# Altium footprint library BB-18.PcbLib: 11 footprints
Each footprint in its own frame and in the unit in brackets; x right, y up, seen from the top. Pads: shape width x height; smd on the part's side, far side on the other; paste and mask are expansions set on the pad; w line width, h text height; cw(c..) or ccw(c..) is an arc to the next point about the centre after c.
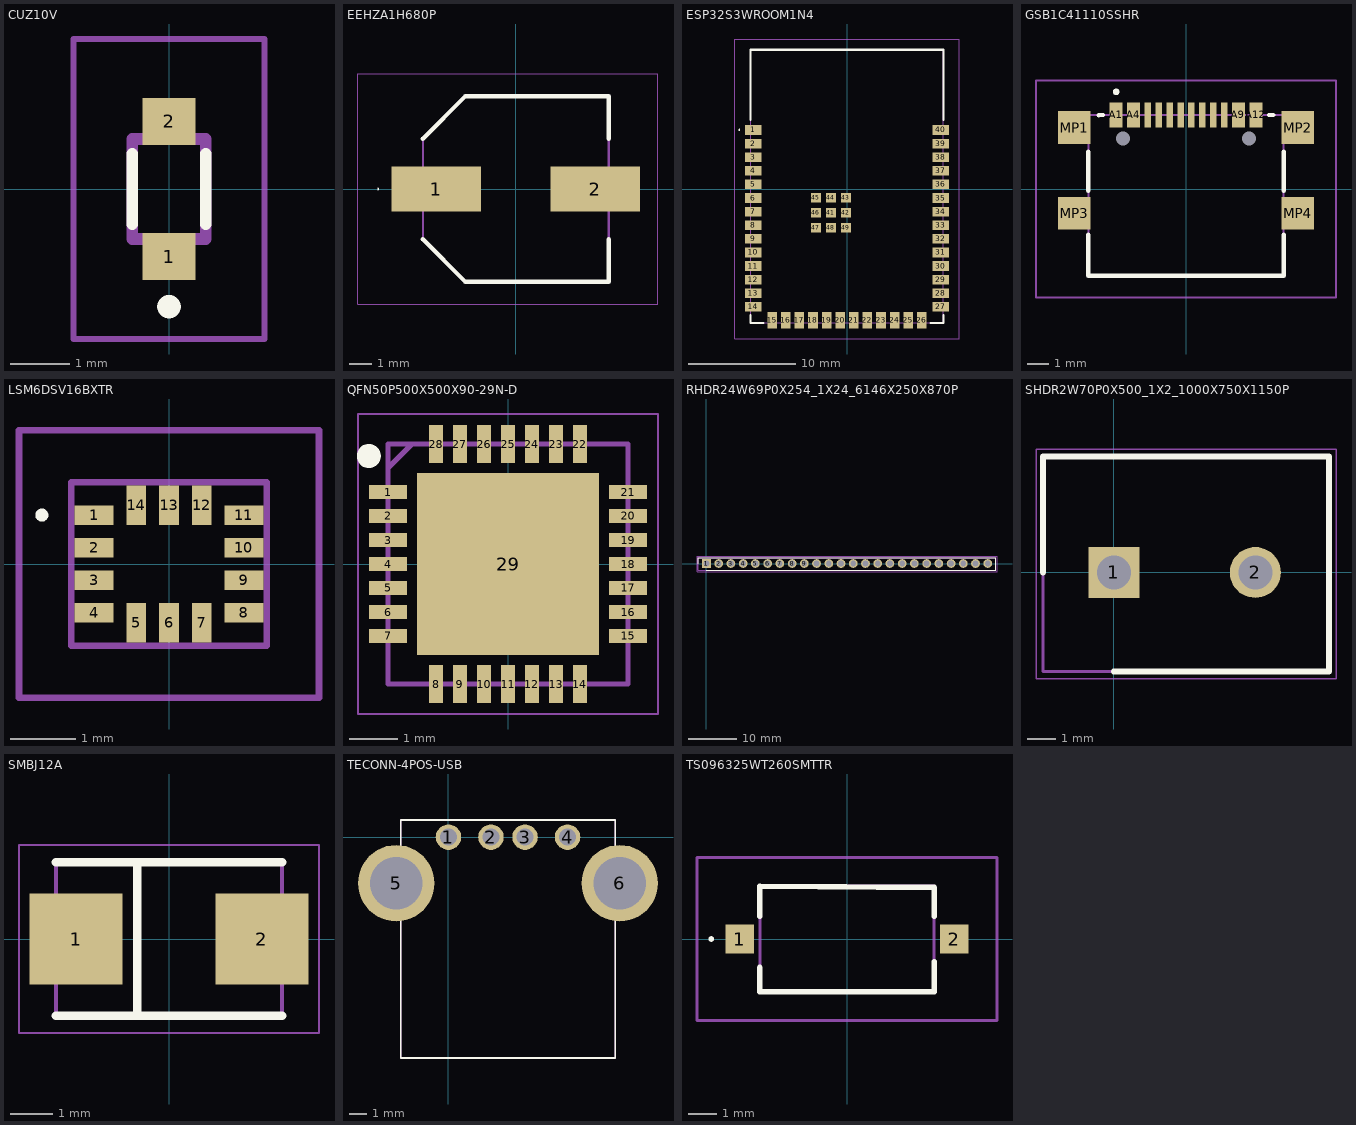
[diagram p0: the footprints below, top view; thin cyan lines are the x and y axes]

## CUZ10V [mm]
pads (2):
  rect 0.9x0.8 smd: 1(0,-1.15) 2(0,1.15)
Top Overlay:
  lines w0.2: -0.625,-0.6 -0.625,0.6 ; 0.625,-0.6 0.625,0.6 ; -0.1,-2 cw(c0,-2) 0.1,-2 cw(c0,-2) -0.1,-2
Mechanical 13:
  lines w0.2: -0.625,-0.85 -0.625,0.85 0.625,0.85 0.625,-0.85 -0.625,-0.85
Mechanical 15:
  lines w0.1: -1.625,-2.55 -1.625,2.55 1.625,2.55 1.625,-2.55 -1.625,-2.55
3D body "CUS05S40,H3F.stp": height 0.9, standoff 0, extent -0.625,-1.25 0.625,1.25

## EEHZA1H680P [mm]
pads (2):
  rect 4x2 smd: 1(-3.55,0) 2(3.55,0)
Top Overlay:
  lines w0.05: -6.175,0 ccw(c-6.15,0) -6.125,0 ccw(c-6.15,0) -6.175,0
  lines w0.2: -4.15,-2.25 -2.25,-4.15 4.15,-4.15 4.15,-2.25 ; -4.15,2.25 -2.25,4.15 4.15,4.15 4.15,2.25
Mechanical 13:
  lines w0.1: -4.15,2.25 -2.25,4.15 ; -4.15,2.25 -4.15,-2.25 -2.25,-4.15 4.15,-4.15 4.15,4.15 -2.25,4.15 ; -4.15,2.25 -2.25,4.15
Mechanical 15:
  lines w0.05: -7.05,-5.15 6.35,-5.15 6.35,5.15 -7.05,5.15 -7.05,-5.15
3D body "EEH-ZA1V151P.stp": height 10.23, standoff 0.03, extent -4.85,-4.15 4.85,4.15

## ESP32S3WROOM1N4 [mm]
pads (49):
  rect 1.5x0.9 smd: 1(-8.75,5.51) 2(-8.75,4.24) 3(-8.75,2.97) 4(-8.75,1.7) 5(-8.75,0.43) 6(-8.75,-0.84) 7(-8.75,-2.11) 8(-8.75,-3.38) 9(-8.75,-4.65) 10(-8.75,-5.92) 11(-8.75,-7.19) 12(-8.75,-8.46) 13(-8.75,-9.73) 14(-8.75,-11) 27(8.75,-11) 28(8.75,-9.73) 29(8.75,-8.46) 30(8.75,-7.19) 31(8.75,-5.92) 32(8.75,-4.65) 33(8.75,-3.38) 34(8.75,-2.11) 35(8.75,-0.84) 36(8.75,0.43) 37(8.75,1.7) 38(8.75,2.97) 39(8.75,4.24) 40(8.75,5.51)
  rect 0.9x1.5 smd: 15(-6.985,-12.25) 16(-5.715,-12.25) 17(-4.445,-12.25) 18(-3.175,-12.25) 19(-1.905,-12.25) 20(-0.635,-12.25) 21(0.635,-12.25) 22(1.905,-12.25) 23(3.175,-12.25) 24(4.445,-12.25) 25(5.715,-12.25) 26(6.985,-12.25)
  rect 0.9x0.9 smd: 41(-1.5,-2.21) 42(-0.1,-2.21) 43(-0.1,-0.81) 44(-1.5,-0.81) 45(-2.9,-0.81) 46(-2.9,-2.21) 47(-2.9,-3.61) 48(-1.5,-3.61) 49(-0.1,-3.61)
Top Overlay:
  lines w0.1: -10.1,5.51 cw(c-10.05,5.51) -10,5.51 cw(c-10.05,5.51) -10.1,5.51
  lines w0.2: -9,-11.75 -9,-12.5 -7.8,-12.5 ; -9,6.45 -9,13 9,13 9,6.45 ; 7.8,-12.5 9,-12.5 9,-11.75
Mechanical 13:
  lines w0.1: -9,-12.5 9,-12.5 9,13 -9,13 -9,-12.5
Mechanical 15:
  lines w0.1: -10.5,-14 10.5,-14 10.5,14 -10.5,14 -10.5,-14
3D body "ESP32-S3-WROOM-1-N4.stp": height 3.25, standoff 0, extent -9,-12.496 9,13.004

## GSB1C41110SSHR [mm]
pads (18):
  rect 0.6x1.15 smd: A1(-3.2,3.39) A4(-2.4,3.39) A9(2.4,3.39) A12(3.2,3.39)
  rect 0.3x1.15 smd: A5(-1.25,3.39) A6(-0.25,3.39) A7(0.25,3.39) A8(1.25,3.39) B5(1.75,3.39) B6(0.75,3.39) B7(-0.75,3.39) B8(-1.75,3.39)
  round 0.325 hole 0.65 unplated: MH1(-2.89,2.315) MH2(2.89,2.315)
  rect 1.5x1.5 smd: MP1(-5.12,2.815) MP2(5.12,2.815) MP3(-5.12,-1.115) MP4(5.12,-1.115)
Top Overlay:
  lines w0.2: -4.47,-2.088 -4.47,-3.965 4.47,-3.965 4.47,-2.088 ; -4.47,-0.088 -4.47,1.712 ; -4,3.385 -3.8,3.39 ; 3.8,3.39 4,3.39 ; 4.47,-0.088 4.47,1.712 ; -3.2,4.4 cw(c-3.2,4.45) -3.2,4.5 ; -3.2,4.4 ccw(c-3.2,4.45) -3.2,4.5 ; -3.2,4.4 cw(c-3.2,4.45) -3.2,4.5
Mechanical 13:
  lines w0.1: -4.47,-3.965 4.47,-3.965 4.47,3.385 -4.47,3.385 -4.47,-3.965
Mechanical 15:
  lines w0.1: -6.87,-4.965 6.87,-4.965 6.87,4.965 -6.87,4.965 -6.87,-4.965
3D body "GSB1C41110SSHR.stp": height 3.12, standoff -0.76, extent -5.67,-4.088 5.67,3.51

## LSM6DSV16BXTR [mm]
pads (14):
  rect 0.6x0.3 smd: 1(-1.15,0.75) 2(-1.15,0.25) 3(-1.15,-0.25) 4(-1.15,-0.75) 8(1.15,-0.75) 9(1.15,-0.25) 10(1.15,0.25) 11(1.15,0.75)
  rect 0.3x0.6 smd: 5(-0.5,-0.9) 6(0,-0.9) 7(0.5,-0.9) 12(0.5,0.9) 13(0,0.9) 14(-0.5,0.9)
Top Overlay:
  lines w0.1: -2,0.75 ccw(c-1.95,0.75) -1.9,0.75 ccw(c-1.95,0.75) -2,0.75
Mechanical 13:
  lines w0.1: -1.5,-1.25 -1.5,1.25 1.5,1.25 1.5,-1.25 -1.5,-1.25
Mechanical 15:
  lines w0.1: -2.3,-2.05 -2.3,2.05 2.3,2.05 2.3,-2.05 -2.3,-2.05
3D body "LSM6DSV16BXTR.stp": height 0.74, standoff 0, extent -1.5,-1.25 1.5,1.25

## QFN50P500X500X90-29N-D [mm]
pads (29):
  rect 0.8x0.3 smd: 1(-2.5,1.5) 2(-2.5,1) 3(-2.5,0.5) 4(-2.5,0) 5(-2.5,-0.5) 6(-2.5,-1) 7(-2.5,-1.5) 15(2.5,-1.5) 16(2.5,-1) 17(2.5,-0.5) 18(2.5,0) 19(2.5,0.5) 20(2.5,1) 21(2.5,1.5)
  rect 0.3x0.8 smd: 8(-1.5,-2.5) 9(-1,-2.5) 10(-0.5,-2.5) 11(0,-2.5) 12(0.5,-2.5) 13(1,-2.5) 14(1.5,-2.5) 22(1.5,2.5) 23(1,2.5) 24(0.5,2.5) 25(0,2.5) 26(-0.5,2.5) 27(-1,2.5) 28(-1.5,2.5)
  rect 3.8x3.8 smd: 29(0,0)
Top Overlay:
  circle w0.25: c-2.9,2.25 r0.125
Mechanical 13:
  lines w0.1: -2.5,2 -2,2.5 ; -2.5,-2.5 -2.5,2.5 2.5,2.5 2.5,-2.5 -2.5,-2.5
Mechanical 15:
  lines w0.05: -3.125,-3.125 -3.125,3.125 3.125,3.125 3.125,-3.125 -3.125,-3.125
3D body "TMC2209-LA-T.stp": height 0.9, standoff 0, extent -2.55,-2.55 2.55,2.55

## RHDR24W69P0X254_1X24_6146X250X870P [mm]
pads (24):
  rect 1.8x1.8 hole 1.2: 1(0,0)
  round 1.8 hole 1.2: 2(2.54,0) 3(5.08,0) 4(7.62,0) 5(10.16,0) 6(12.7,0) 7(15.24,0) 8(17.78,0) 9(20.32,0) 10(22.86,0) 11(25.4,0) 12(27.94,0) 13(30.48,0) 14(33.02,0) 15(35.56,0) 16(38.1,0) 17(40.64,0) 18(43.18,0) 19(45.72,0) 20(48.26,0) 21(50.8,0) 22(53.34,0) 23(55.88,0) 24(58.42,0)
Top Overlay:
  lines w0.2: -1.72,0 -1.72,1.25 60.09,1.25 60.09,-1.45 0,-1.45
Mechanical 13:
  lines w0.1: -1.72,-1.45 -1.72,1.25 60.09,1.25 60.09,-1.45 -1.72,-1.45
Mechanical 15:
  lines w0.05: -1.97,-1.7 -1.97,1.5 60.34,1.5 60.34,-1.7 -1.97,-1.7
3D body "SSK02-FPH-254-A24.stp": height 8.7, standoff -3.3, extent -1.52,-1.25 59.94,1.25

## SHDR2W70P0X500_1X2_1000X750X1150P [mm]
pads (2):
  rect 1.8x1.8 hole 1.2: 1(0,0)
  round 1.8 hole 1.2: 2(5,0)
Top Overlay:
  lines w0.2: -2.5,0 -2.5,4.1 7.6,4.1 7.6,-3.5 0,-3.5
Mechanical 13:
  lines w0.1: -2.5,-3.5 7.6,-3.5 7.6,4.1 -2.5,4.1 -2.5,-3.5
Mechanical 15:
  lines w0.05: -2.75,-3.75 7.85,-3.75 7.85,4.35 -2.75,4.35 -2.75,-3.75
3D body "691137710002.stp": height 11.5, standoff -3.6, extent -2.45,-3.45 7.55,4.05

## SMBJ12A [mm]
pads (2):
  rect 2.2x2.15 smd: 1(-2.2,0) 2(2.2,0)
Top Overlay:
  lines w0.2: -2.675,-1.812 2.675,-1.812 ; -2.675,1.812 2.675,1.812 ; -0.75,-1.812 -0.75,1.812
Mechanical 13:
  lines w0.1: -2.675,-1.812 2.675,-1.812 2.675,1.812 -2.675,1.812 -2.675,-1.812
Mechanical 15:
  lines w0.05: -3.55,-2.225 3.55,-2.225 3.55,2.225 -3.55,2.225 -3.55,-2.225
3D body "SMBJ22A.stp": height 2.33, standoff 0.01, extent -2.675,-1.86 2.675,1.86

## TECONN-4POS-USB [mm]
pads (6):
  round 1.5 hole 1: 1(0,0) 2(2.5,0) 3(4.5,0) 4(7,0)
  round 4.5 hole 3.1: 5(-3.07,-2.71) 6(10.07,-2.71)
Top Overlay:
  lines w0.1: -2.8,-12.99 9.8,-12.99 9.8,1.01 -2.8,1.01 -2.8,-12.99
Mechanical 13:
  lines w0.1: -2.8,-12.99 9.8,-12.99 9.8,1.01 -2.8,1.01 -2.8,-12.99
3D body "292303-1.stp": height 7.72, standoff -3.64, extent -4.615,-12.99 11.617,1.01

## TS096325WT260SMTTR [mm]
pads (2):
  rect 1x1 smd: 1(-3.75,0) 2(3.75,0)
Top Overlay:
  lines w0.1: -4.8,0 cw(c-4.75,0) -4.7,0 cw(c-4.75,0) -4.8,0
  lines w0.2: -3.05,-1 -3.05,-1.85 3.05,-1.85 3.05,-0.8 ; -3.05,0.8 -3.05,1.85 3.05,1.8 3.05,0.8
Mechanical 13:
  lines w0.1: -3.05,-1.85 -3.05,1.85 3.05,1.85 3.05,-1.85 -3.05,-1.85
Mechanical 15:
  lines w0.1: -5.25,-2.85 -5.25,2.85 5.25,2.85 5.25,-2.85 -5.25,-2.85
3D body "TS09-63-25-WT-260-SMT-TR.stp": height 2.5, standoff -0.05, extent -4.05,-1.85 4.05,1.85